# Altium footprint library amirlib.PcbLib: 456 footprints (part 24 of 29)
Each footprint in its own frame and in the unit in brackets; x right, y up, seen from the top. Pads: shape width x height; smd on the part's side, far side on the other; paste and mask are expansions set on the pad; w line width, h text height; cw(c..) or ccw(c..) is an arc to the next point about the centre after c.
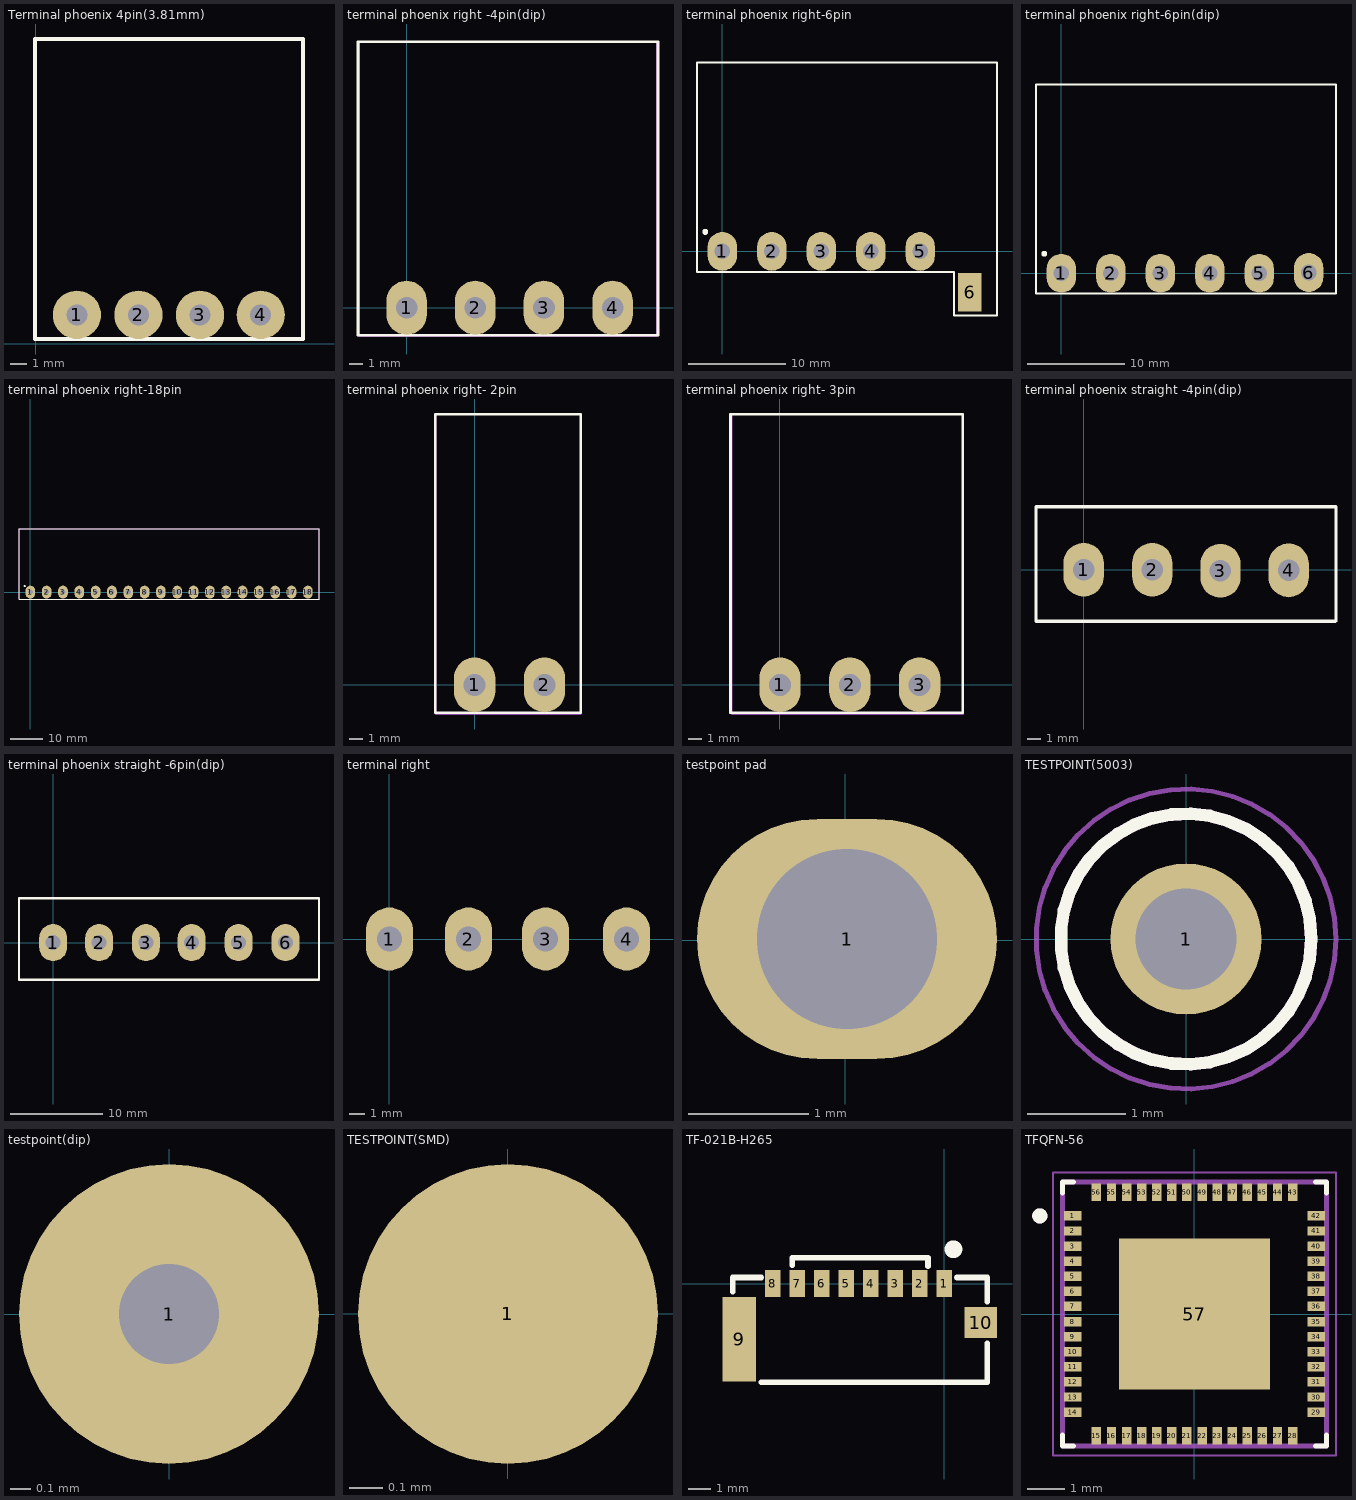
[diagram p23: the footprints below, top view; thin cyan lines are the x and y axes]

## Terminal phoenix 4pin(3.81mm) [mm]
pads (4):
  round 3 hole 1.3: 1(2.55,1.8) 2(6.375,1.8) 3(10.2,1.8) 4(13.975,1.8)
Top Overlay:
  lines w0.254: -0.05,0.3 16.6,0.3 16.6,18.95 -0.05,18.95 -0.05,0.3
3D body "User Library-KEFA 3_81mm_4pin_RA.STEP": height 11.18, standoff -0.1, extent -0.015,0.5 16.615,18.9

## terminal phoenix right -4pin(dip) [mm]
pads (4):
  oval 3x4 hole 1.6: 1(0,0) 2(5.08,0) 3(10.16,0) 4(15.24,0)
Top Overlay:
  lines w0.2: -3.6,-2.025 18.6,-2.025 18.6,19.675 -3.6,19.675 -3.6,-2.025
Mechanical 13:
  lines w0.1: -3.5,-2.125 18.5,-2.125 18.5,19.7 -3.5,19.7 -3.5,-2.125
3D body "691313710004.stp": height 8.55, standoff -3.45, extent -3.38,-1.936 18.62,10.064
3D body "1757035.stp": height 15.27, standoff 0.27, extent -2.769,1.256 17.551,19.456

## terminal phoenix right-6pin [mm]
pads (6):
  oval 3x4 hole 1.6: 1(0,0) 2(5.08,0) 3(10.16,0) 4(15.24,0) 5(20.32,0)
  rect 2.4x4 smd: 6(25.4,-4.2)
Top Overlay:
  circle w0.4: c-1.76,2 r0.1
  lines w0.2: -2.6,-2.1 -2.6,19.4 28.2,19.4 28.2,-6.6 23.8,-6.6 23.8,-2.1 -2.6,-2.1
Mechanical 13:
  lines w0.1: -2.6,-2.1 -2.6,19.4 28.2,19.4 28.2,-6.5
3D body "1757051.stp": height 15.27, standoff 0.27, extent -2.44,0.9 28.04,19.1
3D body "1757514.stp": height 8.6, standoff -3.5, extent -3.2,-2 28.8,10

## terminal phoenix right-6pin(dip) [mm]
pads (6):
  oval 3x4 hole 1.6: 1(0,0) 2(5.08,0) 3(10.16,0) 4(15.24,0) 5(20.32,0) 6(25.4,0.075)
Top Overlay:
  circle w0.4: c-1.76,2 r0.1
  lines w0.2: -2.6,-2.1 -2.6,19.4 28.2,19.4 28.2,-2.1 23.8,-2.1 -2.6,-2.1
Mechanical 13:
  lines w0.1: -2.6,-2.1 -2.6,19.4 28.2,19.4 28.2,-2.1
3D body "1757051.stp": height 15.27, standoff 0.27, extent -2.44,0.9 28.04,19.1
3D body "1757514.stp": height 8.6, standoff -3.5, extent -3.2,-2 28.8,10

## terminal phoenix right-18pin [mm]
pads (18):
  oval 3x4 hole 1.6: 1(0,0) 2(5.08,0) 3(10.16,0) 4(15.24,0) 5(20.32,0) 6(25.4,0) 7(30.48,0) 8(35.56,0) 9(40.64,0) 10(45.72,0) 11(50.8,0) 12(55.88,0) 13(60.96,0) 14(66.04,0) 15(71.12,0) 16(76.2,0) 17(81.28,0) 18(86.36,0)
Top Overlay:
  circle w0.4: c-1.76,1.925 r0.1
  lines w0.2: -3.48,-2.175 -3.48,19.685 89.84,19.685 89.84,-2.175 23.8,-2.175 -3.48,-2.175
Mechanical 13:
  lines w0.1: -3.531,-2.175 -3.531,19.685 89.84,19.685 89.84,-2.175
3D body "18 Position Male Rightangle.step": height 8.5, standoff -4, extent -3.353,-1.961 89.687,10.039
3D body "18 Position Female.step": height 15, standoff 0, extent -2.388,1.67 89.052,19.7

## terminal phoenix right- 2pin [mm]
pads (2):
  oval 3x4 hole 1.6: 1(0,0) 2(5.08,0)
Top Overlay:
  lines w0.2: -2.87,-2.025 7.722,-2.025 7.722,19.675 -2.87,19.675 -2.87,-2.025
Mechanical 13:
  lines w0.1: -2.845,-2.125 7.722,-2.125 7.722,19.7 -2.845,19.7 -2.845,-2.125
3D body "Plug 200mil.STEP": height 14.45, standoff -0.55, extent -2.667,1.195 7.493,19.395
3D body "2P.STEP": height 8.3, standoff -3.9, extent -2.591,-1.987 7.569,10.013

## terminal phoenix right- 3pin [mm]
pads (3):
  oval 3x4 hole 1.6: 1(0,0) 2(5.08,0) 3(10.16,0)
Top Overlay:
  lines w0.2: -3.6,-2.025 13.298,-2.025 13.298,19.675 -3.6,19.675 -3.6,-2.025
Mechanical 13:
  lines w0.1: -3.5,-2.125 13.349,-2.125 13.349,19.7 -3.5,19.7 -3.5,-2.125
3D body "3P.STEP": height 8.3, standoff -3.9, extent -2.591,-2 12.649,10
3D body "blz_5_08_3_-1526560000.stp": height 15.2, standoff 0, extent -2.692,1.201 12.548,21.201

## terminal phoenix straight -4pin(dip) [mm]
pads (4):
  oval 3x4 hole 1.6: 1(0,0) 2(5.1,0) 3(10.175,-0.075) 4(15.25,-0.05)
Top Overlay:
  lines w0.254: -3.55,-3.85 -3.55,4.7 18.775,4.7 18.775,-3.8 18.725,-3.85 -3.55,-3.85
3D body "1757035.stp": height -3.2, standoff -21.4, extent -2.685,-3.825 17.635,11.175
3D body "1924321.stp": height 12, standoff -3.9, extent -3.535,-3.825 18.785,4.775

## terminal phoenix straight -6pin(dip) [mm]
pads (6):
  oval 3x4 hole 1.6: 1(0,0) 2(4.95,0) 3(9.975,0) 4(14.9,0) 5(19.95,0) 6(25,0)
Top Overlay:
  lines w0.254: -3.675,-4 -3.675,4.775 28.6,4.775 28.6,-4 -3.675,-4
3D body "1755558.stp": height 12, standoff -3.9, extent -3.55,-3.875 28.45,4.725
3D body "1757051.stp": height 21.9, standoff 3.7, extent -2.725,-3.725 27.755,11.275

## terminal right [mm]
pads (4):
  oval 3x4 hole 1.6: 1(0,0) 2(5.025,0) 3(9.925,0) 4(15.075,0)
3D body "terminal_blocks_a-tb500-vj04v.stp": height 10.5, standoff -4, extent -3.106,-19.604 18.127,0.398

## testpoint pad [mm]
pads (1):
  oval 2.5x2 hole 1.5: 1(0.013,0.011)

## TESTPOINT(5003) [mm]
pads (1):
  round 1.53 hole 1.02: 1(0,0)
Top Overlay:
  circle w0.127: c0,0 r1.27
Mechanical 13:
  circle w0.127: c0,0 r1.27
Mechanical 15:
  circle w0.05: c0,0 r1.52
3D body "step_temp.STEP": height 4.57, standoff -3.05, extent -1.27,-1.27 1.27,1.27

## testpoint(dip) [mm]
pads (1):
  round 1.5 hole 0.5: 1(0,0)

## TESTPOINT(SMD) [mm]
pads (1):
  round 0.9 smd: 1(0,0)

## TF-021B-H265 [mm]
pads (10):
  rect 0.7x1.2 smd paste+0 mask+0.051: 1(0,0) 2(-1.1,0) 3(-2.2,0) 4(-3.3,0) 5(-4.4,0) 6(-5.5,0) 7(-6.6,0) 8(-7.7,0)
  rect 1.5x3.8 smd paste+0 mask+0.051: 9(-9.2,-2.5)
  rect 1.45x1.4 smd paste+0 mask+0.051: 10(1.65,-1.75)
Top Overlay:
  circle w0.5: c0.416,1.544 r0.15
  lines w0.254: -9.49,-0.369 -9.49,0.274 -8.22,0.274 ; -8.22,-4.425 1.94,-4.425 1.94,-2.681 ; -6.823,0.831 -6.823,1.163 -0.727,1.163 -0.727,0.782 ; 0.581,0.274 1.94,0.274 1.94,-0.819
Mechanical 15:
  circle w0.254: c0.035,0.274 r0.127
3D body "TF-021B-H265_Altium_RealSize.step": height 2.5, standoff 0, extent -9.282,-4.401 2.068,1.099

## TFQFN-56 [mm]
pads (57):
  rect 0.47x0.25 smd mask+0.05: 1(-3.225,2.6) 2(-3.225,2.2) 3(-3.225,1.8) 4(-3.225,1.4) 5(-3.225,1) 6(-3.225,0.6) 7(-3.225,0.2) 8(-3.225,-0.2) 9(-3.225,-0.6) 10(-3.225,-1) 11(-3.225,-1.4) 12(-3.225,-1.8) 13(-3.225,-2.2) 14(-3.225,-2.6) 29(3.225,-2.6) 30(3.225,-2.2) 31(3.225,-1.8) 32(3.225,-1.4) 33(3.225,-1) 34(3.225,-0.6) 35(3.225,-0.2) 36(3.225,0.2) 37(3.225,0.6) 38(3.225,1) 39(3.225,1.4) 40(3.225,1.8) 41(3.225,2.2) 42(3.225,2.6)
  rect 0.25x0.47 smd mask+0.05: 15(-2.6,-3.225) 16(-2.2,-3.225) 17(-1.8,-3.225) 18(-1.4,-3.225) 19(-1,-3.225) 20(-0.6,-3.225) 21(-0.2,-3.225) 22(0.2,-3.225) 23(0.6,-3.225) 24(1,-3.225) 25(1.4,-3.225) 26(1.8,-3.225) 27(2.2,-3.225) 28(2.6,-3.225) 43(2.6,3.225) 44(2.2,3.225) 45(1.8,3.225) 46(1.4,3.225) 47(1,3.225) 48(0.6,3.225) 49(0.2,3.225) 50(-0.2,3.225) 51(-0.6,3.225) 52(-1,3.225) 53(-1.4,3.225) 54(-1.8,3.225) 55(-2.2,3.225) 56(-2.6,3.225)
  rect 4x4 smd paste-3: 57(0,0)
Top Overlay:
  circle w0.2: c-4.1,2.6 r0.1
  lines w0.127: -3.5,-3.2 -3.5,-3.5 -3.2,-3.5 ; -3.5,3.2 -3.5,3.5 -3.2,3.5 ; 3.2,-3.5 3.5,-3.5 3.5,-3.2 ; 3.2,3.5 3.5,3.5 3.5,3.2
Top Paste:
  region: -0.245,-1.515 -1.515,-1.515 -1.515,-0.245 -0.245,-0.245
  region: 1.515,-1.515 0.245,-1.515 0.245,-0.245 1.515,-0.245
  region: 1.515,0.245 0.245,0.245 0.245,1.515 1.515,1.515
  region: -0.245,0.245 -1.515,0.245 -1.515,1.515 -0.245,1.515
Mechanical 13:
  circle w0.2: c-4.1,2.6 r0.1
  lines w0.127: -3.5,-3.5 3.5,-3.5 3.5,3.5 -3.5,3.5 -3.5,-3.5
Mechanical 15:
  lines w0.05: -3.75,-3.75 3.75,-3.75 3.75,3.75 -3.75,3.75 -3.75,-3.75
3D body "step_temp.STEP": height 1.06, standoff 0, extent -3.5,-3.5 3.5,3.5